# Altium footprint library SamacSys.PcbLib: 1008 footprints (part 2 of 63)
Each footprint in its own frame and in the unit in brackets; x right, y up, seen from the top. Pads: shape width x height; smd on the part's side, far side on the other; paste and mask are expansions set on the pad; w line width, h text height; cw(c..) or ccw(c..) is an arc to the next point about the centre after c.
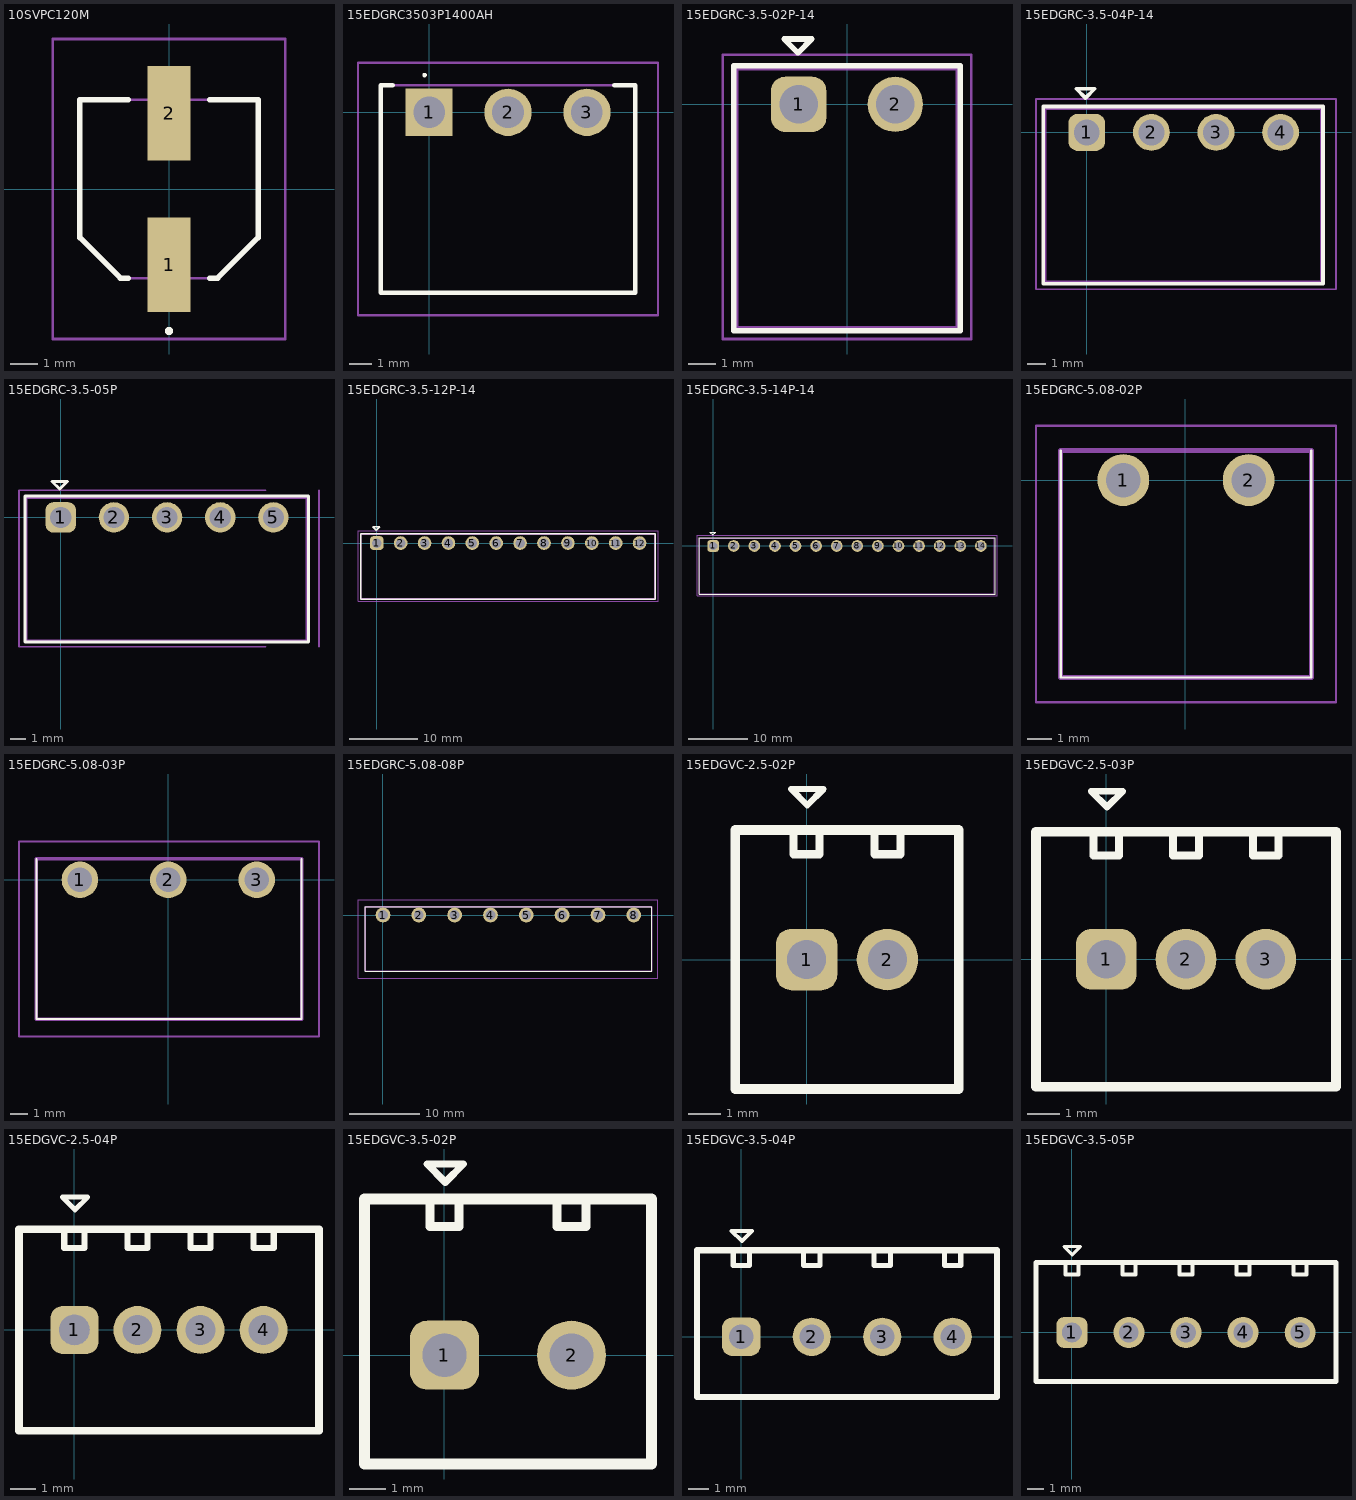
[diagram p1: the footprints below, top view; thin cyan lines are the x and y axes]

## 10SVPC120M [mm]
pads (2):
  rect 1.6x3.5 smd: 1(0,-2.8) 2(0,2.8)
Top Overlay:
  lines w0.2: -1.5,-3.3 -1.8,-3.3 -3.3,-1.8 -3.3,3.3 -1.5,3.3 ; 1.5,-3.3 1.8,-3.3 3.3,-1.8 3.3,3.3 1.5,3.3 ; 0,-5.3 ccw(c0,-5.25) 0,-5.2 ; 0,-5.3 cw(c0,-5.25) 0,-5.2 ; 0,-5.3 ccw(c0,-5.25) 0,-5.2
Assembly:
  lines w0.1: -3.3,-1.8 -1.8,-3.3 1.8,-3.3 3.3,-1.8 3.3,3.3 -3.3,3.3 -3.3,2.7 -3.3,-1.8
Countryard:
  lines w0.1: -4.3,-5.55 -4.3,5.55 4.3,5.55 4.3,-5.55 -4.3,-5.55
3D body "10SVPC120MV.stp": height 5.96, standoff 0.06, extent -3.3,-3.65 3.3,3.65

## 15EDGRC3503P1400AH [mm]
pads (3):
  rect 2.1x2.1 hole 1.4: 1(0,0)
  round 2.1 hole 1.4: 2(3.5,0) 3(7,0)
Top Overlay:
  lines w0.1: -0.2,1.6 cw(c-0.2,1.65) -0.2,1.7 cw(c-0.2,1.65) -0.2,1.6
  lines w0.2: -1.6,1.2 -2.15,1.2 -2.15,-8 9.15,-8 9.15,1.2 8.2,1.2
Assembly:
  lines w0.1: -2.15,-8 -2.15,1.2 9.15,1.2 9.15,-8 -2.15,-8
Countryard:
  lines w0.1: -3.15,-9 -3.15,2.2 10.15,2.2 10.15,-9 -3.15,-9
3D body "15EDGRC-3.5-03P-14-00AH.stp": height 7.56, standoff -5, extent -2.15,-8 9.15,1.2

## 15EDGRC-3.5-02P-14 [mm]
height 14
pads (2):
  rrect50% 2x2 hole 1.4: 1(-1.75,0)
  round 2 hole 1.4: 2(1.75,0)
Top Overlay:
  lines w0.2: -4.1,-8.2 -4.1,1.4 4.1,1.4 4.1,-8.2 -4.1,-8.2 ; -2.276,2.367 -1.276,2.367 -1.776,1.867 -2.276,2.367
Assembly:
  lines w0.15: -4,-8.1 -4,1.3 4,1.3 4,-8.1 -4,-8.1
Countryard:
  lines w0.1: -4.5,-8.5 4.5,-8.5 4.5,1.8 -4.5,1.8 -4.5,-8.5
3D body "15EDGRC-3.5-02P-14-00A(H).stp": height 7.29, standoff -3.35, extent -3.9,-8 3.9,1.2

## 15EDGRC-3.5-04P-14 [mm]
height 14
pads (4):
  rrect50% 2x2 hole 1.4: 1(0,0)
  round 2 hole 1.4: 2(3.5,0) 3(7,0) 4(10.5,0)
Top Overlay:
  lines w0.2: -2.35,-8.2 -2.35,1.4 12.8,1.4 12.8,-8.2 -2.35,-8.2 ; -0.574,2.367 -0.074,1.867 0.426,2.367 -0.574,2.367
Assembly:
  lines w0.15: -2.25,-8.1 -2.25,1.3 12.7,1.3 12.7,-8.1 -2.25,-8.1
Countryard:
  lines w0.1: -2.75,-8.5 -2.75,1.8 13.5,1.8 13.5,-8.5 -2.75,-8.5
3D body "15EDGRC-3.5-04P-1Y-00A&Z(H).stp": height 7.29, standoff -3.35, extent -1.9,-8 12.9,1.2

## 15EDGRC-3.5-05P [mm]
height 14
pads (5):
  rrect50% 2x2 hole 1.4: 1(0,0)
  round 2 hole 1.4: 2(3.5,0) 3(7,0) 4(10.5,0) 5(14,0)
Top Overlay:
  lines w0.2: -2.35,-8.2 16.3,-8.2 16.3,1.4 -2.35,1.4 -2.35,-8.2 ; -0.574,2.367 0.426,2.367 -0.074,1.867 -0.574,2.367
Assembly:
  lines w0.15: -2.25,-8.1 16.2,-8.1 16.2,1.3 -2.25,1.3 -2.25,-8.1
Countryard:
  lines w0.1: 13.5,-8.5 -2.75,-8.5 -2.75,1.8 13.5,1.8 ; 17,-8.5 17,1.8
3D body "15EDGRC-3.5-05P-1Y-00A&Z(H).stp": height 7.29, standoff -3.35, extent -2.15,-8 16.15,1.2

## 15EDGRC-3.5-12P-14 [mm]
height 14
pads (12):
  rrect50% 2x2 hole 1.4: 1(0,0)
  round 2 hole 1.4: 2(3.5,0) 3(7,0) 4(10.5,0) 5(14,0) 6(17.5,0) 7(21,0) 8(24.5,0) 9(28,0) 10(31.5,0) 11(35,0) 12(38.5,0)
Top Overlay:
  lines w0.2: -2.35,-8.2 40.8,-8.2 40.8,1.4 -2.35,1.4 -2.35,-8.2 ; -0.574,2.367 0.426,2.367 -0.074,1.867 -0.574,2.367
Assembly:
  lines w0.15: -2.25,-8.1 40.7,-8.1 40.7,1.3 -2.25,1.3 -2.25,-8.1
Countryard:
  lines w0.1: -2.75,-8.5 41.2,-8.5 41.2,1.8 -2.75,1.8 -2.75,-8.5
3D body "15EDGRC-3.5-12P-14-00A(H).stp": height 7.29, standoff -3.35, extent -2.2,-8 40.6,1.2

## 15EDGRC-3.5-14P-14 [mm]
height 14
pads (14):
  rrect50% 2x2 hole 1.4: 1(0,0)
  round 2 hole 1.4: 2(3.5,0) 3(7,0) 4(10.5,0) 5(14,0) 6(17.5,0) 7(21,0) 8(24.5,0) 9(28,0) 10(31.5,0) 11(35,0) 12(38.5,0) 13(42,0) 14(45.5,0)
Top Overlay:
  lines w0.2: -2.35,-8.2 -2.35,1.4 47.95,1.4 47.95,-8.2 -2.35,-8.2 ; -0.574,2.367 -0.074,1.867 0.426,2.367 -0.574,2.367
Assembly:
  lines w0.15: -2.25,-8.1 -2.25,1.3 47.75,1.3 47.75,-8.1 -2.25,-8.1
Countryard:
  lines w0.1: -2.75,-8.5 -2.75,1.8 48.25,1.8 48.25,-8.5 -2.75,-8.5
3D body "15EDGRC-3.5-14P-14-00A(H).stp": height 7.29, standoff -3.35, extent -2.1,-8 47.7,1.2

## 15EDGRC-5.08-02P [mm]
pads (2):
  round 2.1 hole 1.4: 1(-2.5,0) 2(2.58,0)
Top Overlay:
  lines w0.1: -5.04,1.2 -5.04,-8 5.12,-8 5.12,1.2
Assembly:
  lines w0.2: -5.04,-8 5.12,-8 5.12,1.2 -5.04,1.2 -5.04,-8
Countryard:
  lines w0.1: -6.04,-9 6.12,-9 6.12,2.2 -6.04,2.2 -6.04,-9
3D body "15EDGRC-5.08-02P-1Y-00A&Z(H).stp": height 7.24, standoff -3.4, extent -5.08,-8 5.08,1.2
3D body "15EDGK-5.08-02P-1Y-00A&Z(H).stp": height 7.75, standoff -3.35, extent -5.1,-17.55 5.06,-2.05

## 15EDGRC-5.08-03P [mm] "15EDGRC-5.08-03P + 15EDGK-5.08-03P"
pads (3):
  round 2.1 hole 1.4: 1(-5.08,0) 2(0,0) 3(5.08,0)
Top Overlay:
  lines w0.1: -7.58,1.2 -7.58,-8 7.66,-8 7.66,1.2
Assembly:
  lines w0.2: -7.58,-8 7.66,-8 7.66,1.2 -7.58,1.2 -7.58,-8
Countryard:
  lines w0.1: -8.58,-9 8.66,-9 8.66,2.2 -8.58,2.2 -8.58,-9
3D body "15EDGK-5.08-03P-1Y-00A&Z(H).stp": height 7.75, standoff -3.35, extent -7.62,-18.04 7.62,-2.54
3D body "15EDGRC-5.08-03P-1Y-00A&Z(H).stp": height 7.24, standoff -3.4, extent -7.62,-7.93 7.62,1.27

## 15EDGRC-5.08-08P [mm]
pads (8):
  round 2.1 hole 1.4: 1(0,0) 2(5.08,0) 3(10.16,0) 4(15.24,0) 5(20.32,0) 6(25.4,0) 7(30.48,0) 8(35.56,0)
Top Overlay:
  lines w0.1: -2.54,-8 38.1,-8 38.1,1.2 -2.54,1.2 -2.54,-8
Assembly:
  lines w0.2: -2.54,-8 -2.54,1.2 38.1,1.2 38.1,-8 -2.54,-8
Countryard:
  lines w0.1: -3.54,-9 -3.54,2.2 39,2.2 39,-9 -3.54,-9
3D body "15EDGRC-5.08-04P-14-00A(H).stp": height 7.24, standoff -3.4, extent -2.6,-7.9 17.72,1.3
3D body "15EDGRC-5.08-04P-14-00A(H).stp": height 7.24, standoff -3.4, extent 17.72,-7.9 38.04,1.3

## 15EDGVC-2.5-02P [mm]
pads (2):
  rrect50% 1.9x1.9 hole 1.2: 1(0,0)
  round 1.9 hole 1.2: 2(2.5,0)
Top Overlay:
  lines w0.2: -0.476,5.267 0.524,5.267 0.024,4.767 -0.476,5.267
  lines w0.25: -0.4,4 -0.4,3.25 0.4,3.25 0.4,3.9 ; 2.1,4 2.1,3.25 2.9,3.25 2.9,3.9
  lines w0.3: -2.2,-4 4.7,-4 4.7,4 -2.2,4 -2.2,-4
3D body "15EDGVC-2.5-02P-14-00A(H).stp": height 10.1, standoff -3.8, extent -2.192,-3.869 4.708,4.231

## 15EDGVC-2.5-03P [mm]
pads (3):
  rrect50% 1.9x1.9 hole 1.2: 1(0,0)
  round 1.9 hole 1.2: 2(2.5,0) 3(5,0)
Top Overlay:
  lines w0.2: -0.476,5.267 0.024,4.767 0.524,5.267 -0.476,5.267
  lines w0.25: -0.4,4 -0.4,3.25 0.4,3.25 0.4,3.9 ; 2.1,4 2.1,3.25 2.9,3.25 2.9,3.9 ; 4.6,4 4.6,3.25 5.4,3.25 5.4,3.9
  lines w0.3: -2.2,-4 7.2,-4 7.2,4 -2.2,4 -2.2,-4
3D body "15EDGVC-2.5-03P-14-00A(H).stp": height 10.1, standoff -3.8, extent -2.192,-3.869 7.208,4.231

## 15EDGVC-2.5-04P [mm]
pads (4):
  rrect50% 1.9x1.9 hole 1.2: 1(0,0)
  round 1.9 hole 1.2: 2(2.5,0) 3(5,0) 4(7.5,0)
Top Overlay:
  lines w0.2: -0.476,5.267 0.524,5.267 0.024,4.767 -0.476,5.267
  lines w0.25: -0.4,4 -0.4,3.25 0.4,3.25 0.4,3.9 ; 2.1,4 2.1,3.25 2.9,3.25 2.9,3.9 ; 4.6,4 4.6,3.25 5.4,3.25 5.4,3.9 ; 7.1,4 7.1,3.25 7.9,3.25 7.9,3.9
  lines w0.3: 9.652,-4 -2.2,-4 -2.2,4 9.652,4 ; 9.7,-4 9.7,4
3D body "15EDGVC-2.5-04P-14-00A(H).stp": height 10.1, standoff -3.8, extent -2.192,-3.869 9.708,4.231

## 15EDGVC-3.5-02P [mm]
pads (2):
  rrect50% 1.9x1.9 hole 1.2: 1(0,0)
  round 1.9 hole 1.2: 2(3.5,0)
Top Overlay:
  lines w0.2: -0.476,5.267 0.024,4.767 0.524,5.267 -0.476,5.267
  lines w0.25: -0.4,4.3 -0.4,3.55 0.4,3.55 0.4,4.2 ; 3.1,4.3 3.1,3.55 3.9,3.55 3.9,4.2
  lines w0.3: -2.2,-3 -2.2,4.3 5.7,4.3 5.7,-3 -2.2,-3
3D body "15EDGVC-3.5-02P-14-00A(H).stp": height 9.2, standoff -3.4, extent -2.1,-3 5.7,4.24

## 15EDGVC-3.5-04P [mm]
pads (4):
  rrect50% 1.9x1.9 hole 1.2: 1(0,0)
  round 1.9 hole 1.2: 2(3.5,0) 3(7,0) 4(10.5,0)
Top Overlay:
  lines w0.2: -0.476,5.267 0.524,5.267 0.024,4.767 -0.476,5.267
  lines w0.25: -0.4,4.3 -0.4,3.55 0.4,3.55 0.4,4.2 ; 3.1,4.3 3.1,3.55 3.9,3.55 3.9,4.2 ; 6.6,4.3 6.6,3.55 7.4,3.55 7.4,4.2 ; 10.1,4.3 10.1,3.55 10.9,3.55 10.9,4.2
  lines w0.3: -2.2,-3 12.7,-3 12.7,4.3 -2.2,4.3 -2.2,-3
3D body "15EDGKD-3.5-04P-1Y-00A&Z(H).stp": height 26, standoff 5.25, extent -2.15,-6.9 12.75,5.5
3D body "15EDGVC-3.5-04P-14-00A(H).stp": height 9.2, standoff -3.4, extent -2.1,-3 12.7,4.24

## 15EDGVC-3.5-05P [mm]
pads (5):
  rrect50% 1.9x1.9 hole 1.2: 1(0,0)
  round 1.9 hole 1.2: 2(3.5,0) 3(7,0) 4(10.5,0) 5(14,0)
Top Overlay:
  lines w0.2: -0.476,5.267 0.524,5.267 0.024,4.767 -0.476,5.267
  lines w0.25: -0.4,4.3 -0.4,3.55 0.4,3.55 0.4,4.2 ; 3.1,4.3 3.1,3.55 3.9,3.55 3.9,4.2 ; 6.6,4.3 6.6,3.55 7.4,3.55 7.4,4.2 ; 10.1,4.3 10.1,3.55 10.9,3.55 10.9,4.2 ; 13.6,4.3 13.6,3.55 14.4,3.55 14.4,4.2
  lines w0.3: -2.2,-3 16.2,-3 16.2,4.3 -2.2,4.3 -2.2,-3
3D body "15EDGVC-3.5-05P-14-00A(H).stp": height 9.2, standoff -3.4, extent -2.1,-3 16.2,4.24